# Altium footprint library slave-mc33771c.PcbLib: 66 footprints (part 5 of 5)
Each footprint in its own frame and in the unit in brackets; x right, y up, seen from the top. Pads: shape width x height; smd on the part's side, far side on the other; paste and mask are expansions set on the pad; w line width, h text height; cw(c..) or ccw(c..) is an arc to the next point about the centre after c.
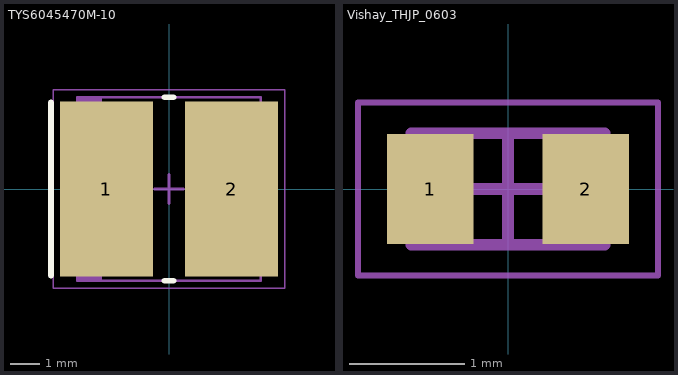
[diagram p4: the footprints below, top view; thin cyan lines are the x and y axes]

## TYS6045470M-10 [mm] "Precision Wire Wound Inductor, 2-Leads, Body 6,00x6,00mm, IPC Medium Density"
height 4.7
pads (2):
  rect 3.2x6 smd: 1(-2.15,0) 2(2.15,0)
Top Overlay:
  lines w0.2: -4.05,-2.975 -4.05,2.975 ; -0.15,-3.15 0.15,-3.15 ; -0.15,3.15 0.15,3.15
Mechanical 13:
  rectangle: -3.15,-3.15 -2.303,3.15
  lines w0.1: -3.15,-3.15 3.15,-3.15 3.15,3.15 -3.15,3.15 -3.15,-3.15
Mechanical 15:
  lines w0.05: -3.975,-3.4 3.975,-3.4 3.975,3.4 -3.975,3.4 -3.975,-3.4
  lines w0.1: -0.5,0 0.5,0 ; 0,-0.5 0,0.5
3D body "TYS6045221M-10.step": height 4.8, standoff 0, extent -3.1,-3 3.1,3

## Vishay_THJP_0603 [mm] "ThermaWick Ceramic thermal coupling, 2-Leads, Body 1,55x0,84mm, IPC Medium Density"
height 0.89
pads (2):
  rect 0.75x0.95 smd: 1(-0.675,0) 2(0.675,0)
Mechanical 13:
  lines w0.1: -0.84,-0.485 -0.84,0.485 0.84,0.485 0.84,-0.485 -0.84,-0.485
Mechanical 15:
  lines w0.05: -1.3,-0.75 -1.3,0.75 1.3,0.75 1.3,-0.75 -1.3,-0.75
  lines w0.1: -0.485,0 0.485,0 ; 0,-0.485 0,0.485
3D body "Vishay_THJP_0603.step": height 0.89, standoff 0, extent -0.84,-0.485 0.84,0.485